# Altium footprint library uw-madison-parts.PcbLib: 40 footprints (part 3 of 3)
Each footprint in its own frame and in the unit in brackets; x right, y up, seen from the top. Pads: shape width x height; smd on the part's side, far side on the other; paste and mask are expansions set on the pad; w line width, h text height; cw(c..) or ccw(c..) is an arc to the next point about the centre after c.
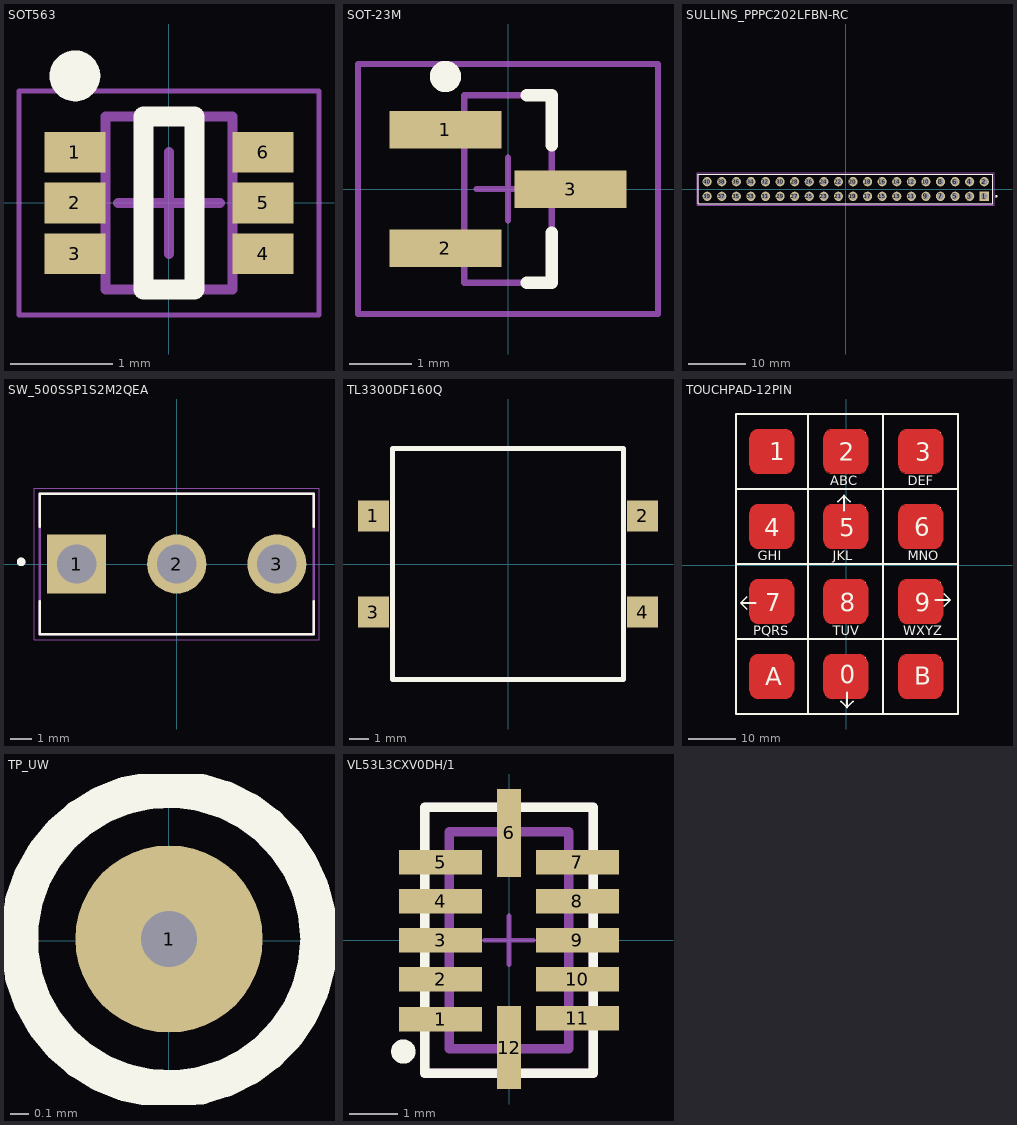
[diagram p2: the footprints below, top view; thin cyan lines are the x and y axes]

## SOT563 [mm]
height 0.5
pads (6):
  rect 0.6x0.4 smd: 1(-0.925,0.5) 2(-0.925,0) 3(-0.925,-0.5) 4(0.925,-0.5) 5(0.925,0) 6(0.925,0.5)
Top Overlay:
  circle w0.25: c-0.925,1.25 r0.125
  lines w0.2: -0.25,-0.85 -0.25,0.85 0.25,0.85 0.25,-0.85 -0.25,-0.85
Top Courtyard:
  lines w0.05: -1.475,-1.1 1.475,-1.1 1.475,1.1 -1.475,1.1 -1.475,-1.1
  lines w0.1: -0.5,0 0.5,0 ; 0,-0.5 0,0.5
Top Assembly:
  lines w0.1: -0.625,-0.85 0.625,-0.85 0.625,0.85 -0.625,0.85 -0.625,-0.85
3D body: height 0.5, standoff 0.1, extent -0.625,-0.85 0.625,0.85

## SOT-23M [mm]
pads (3):
  rect 1.8x0.6 smd: 1(-1,0.95) 2(-1,-0.95) 3(1,0)
Top Overlay:
  circle w0.25: c-1,1.8 r0.125
  lines w0.2: 0.3,-1.5 0.7,-1.5 0.7,-0.7 ; 0.3,1.5 0.7,1.5 0.7,0.7
Mechanical 13:
  lines w0.1: -0.7,-1.5 -0.7,1.5 0.7,1.5 0.7,-1.5 -0.7,-1.5
Mechanical 15:
  lines w0.1: -0.5,0 0.5,0 ; 0,-0.5 0,0.5 ; -2.4,-2 -2.4,2 2.4,2 2.4,-2 -2.4,-2
3D body: height 1.1, standoff 0, extent -0.7,-1.5 0.7,1.5

## SULLINS_PPPC202LFBN-RC [mm]
height 8.5
pads (40):
  rect 1.605x1.605 / inner round 1.605 / far side rect 1.605x1.605 hole 1.07: 1(24.13,-1.27)
  round 1.605 hole 1.07: 2(24.13,1.27) 3(21.59,-1.27) 4(21.59,1.27) 5(19.05,-1.27) 6(19.05,1.27) 7(16.51,-1.27) 8(16.51,1.27) 9(13.97,-1.27) 10(13.97,1.27) 11(11.43,-1.27) 12(11.43,1.27) 13(8.89,-1.27) 14(8.89,1.27) 15(6.35,-1.27) 16(6.35,1.27) 17(3.81,-1.27) 18(3.81,1.27) 19(1.27,-1.27) 20(1.27,1.27) 21(-1.27,-1.27) 22(-1.27,1.27) 23(-3.81,-1.27) 24(-3.81,1.27) 25(-6.35,-1.27) 26(-6.35,1.27) 27(-8.89,-1.27) 28(-8.89,1.27) 29(-11.43,-1.27) 30(-11.43,1.27) 31(-13.97,-1.27) 32(-13.97,1.27) 33(-16.51,-1.27) 34(-16.51,1.27) 35(-19.05,-1.27) 36(-19.05,1.27) 37(-21.59,-1.27) 38(-21.59,1.27) 39(-24.13,-1.27) 40(-24.13,1.27)
Top Overlay:
  circle w0.2: c26.25,-1.27 r0.1
  lines w0.127: -25.65,-2.54 -25.65,2.54 25.65,2.54 25.65,-2.54 -25.65,-2.54
Mechanical 13:
  circle w0.2: c26.25,-1.27 r0.1
  lines w0.127: -25.65,-2.54 -25.65,2.54 25.65,2.54 25.65,-2.54 -25.65,-2.54
Mechanical 15:
  lines w0.05: -25.9,-2.79 -25.9,2.79 25.9,2.79 25.9,-2.79 -25.9,-2.79
3D body "step_temp.STEP": height 8.51, standoff -3.4, extent -25.654,-2.54 25.654,2.54

## SW_500SSP1S2M2QEA [mm]
pads (3):
  rect 2.775x2.775 hole 1.85: 1(-4.7,0)
  round 2.775 hole 1.85: 2(0,0) 3(4.7,0)
Top Overlay:
  circle w0.2: c-7.3,0.1 r0.1
  lines w0.127: -6.425,-1.75 -6.425,-3.3 6.425,-3.3 6.425,-1.75 ; -6.425,1.75 -6.425,3.3 6.425,3.3 6.425,1.75
Mechanical 13:
  circle w0.2: c-7.3,0.1 r0.1
  lines w0.127: -6.425,-3.3 -6.425,3.3 6.425,3.3 6.425,-3.3 -6.425,-3.3
Mechanical 15:
  lines w0.05: -6.675,-3.55 -6.675,3.55 6.675,3.55 6.675,-3.55 -6.675,-3.55
3D body "500SSPxS2M2xEA.stp": height 13.59, standoff -6.6, extent -6.412,-3.329 6.288,3.271

## TL3300DF160Q [mm] "SWITCH TACTILE SPST-NO 0.05A 12V"
pads (4):
  rect 1.6x1.6 smd: 1(-7,2.5) 2(7,2.5) 3(-7,-2.5) 4(7,-2.5)
Top Overlay:
  lines w0.254: -6,-6 -6,6 6,6 6,-6 -6,-6
3D body "TL3300DFxxxQ.stp": height 4.3, standoff -0.3, extent -7.507,-6.031 7.493,5.969

## TOUCHPAD-12PIN [mil] "4X3 numeric touch pad"
pads (12):
  round 5 smd mask+0: 0(162.32,-770.18) 1(-452.68,1104.82) 2(162.32,1104.82) 3(787.32,1104.82) 4(-452.68,479.82) 5(162.32,479.82) 6(787.32,479.82) 7(-452.68,-145.18) 8(162.32,-145.18) 9(787.32,-145.18) 10(-452.68,-770.18) 11(787.32,-770.18)
Top Layer:
  region: 807.32,-815.18 807.32,-1040.18 782.32,-1090.18 732.32,-1115.18 507.32,-1115.18 457.32,-1090.18 432.32,-1040.18 432.32,-815.18 457.32,-765.18 507.32,-740.18 732.32,-740.18 782.32,-765.18
  region: -432.68,-815.18 -432.68,-1040.18 -457.68,-1090.18 -507.68,-1115.18 -732.68,-1115.18 -782.68,-1090.18 -807.68,-1040.18 -807.68,-815.18 -782.68,-765.18 -732.68,-740.18 -507.68,-740.18 -457.68,-765.18
  region: 807.32,-190.18 807.32,-415.18 782.32,-465.18 732.32,-490.18 507.32,-490.18 457.32,-465.18 432.32,-415.18 432.32,-190.18 457.32,-140.18 507.32,-115.18 732.32,-115.18 782.32,-140.18
  region: 182.32,-190.18 182.32,-415.18 157.32,-465.18 107.32,-490.18 -117.68,-490.18 -167.68,-465.18 -192.68,-415.18 -192.68,-190.18 -167.68,-140.18 -117.68,-115.18 107.32,-115.18 157.32,-140.18
  region: -432.68,-190.18 -432.68,-415.18 -457.68,-465.18 -507.68,-490.18 -732.68,-490.18 -782.68,-465.18 -807.68,-415.18 -807.68,-190.18 -782.68,-140.18 -732.68,-115.18 -507.68,-115.18 -457.68,-140.18
  region: 807.32,434.82 807.32,209.82 782.32,159.82 732.32,134.82 507.32,134.82 457.32,159.82 432.32,209.82 432.32,434.82 457.32,484.82 507.32,509.82 732.32,509.82 782.32,484.82
  region: 182.32,434.82 182.32,209.82 157.32,159.82 107.32,134.82 -117.68,134.82 -167.68,159.82 -192.68,209.82 -192.68,434.82 -167.68,484.82 -117.68,509.82 107.32,509.82 157.32,484.82
  region: -432.68,434.82 -432.68,209.82 -457.68,159.82 -507.68,134.82 -732.68,134.82 -782.68,159.82 -807.68,209.82 -807.68,434.82 -782.68,484.82 -732.68,509.82 -507.68,509.82 -457.68,484.82
  region: -432.68,1059.82 -432.68,834.82 -457.68,784.82 -507.68,759.82 -732.68,759.82 -782.68,784.82 -807.68,834.82 -807.68,1059.82 -782.68,1109.82 -732.68,1134.82 -507.68,1134.82 -457.68,1109.82
  region: 182.32,1059.82 182.32,834.82 157.32,784.82 107.32,759.82 -117.68,759.82 -167.68,784.82 -192.68,834.82 -192.68,1059.82 -167.68,1109.82 -117.68,1134.82 107.32,1134.82 157.32,1109.82
  region: 807.32,1059.82 807.32,834.82 782.32,784.82 732.32,759.82 507.32,759.82 457.32,784.82 432.32,834.82 432.32,1059.82 457.32,1109.82 507.32,1134.82 732.32,1134.82 782.32,1109.82
  region: 182.32,-815.18 182.32,-1040.18 157.32,-1090.18 107.32,-1115.18 -117.68,-1115.18 -167.68,-1090.18 -192.68,-1040.18 -192.68,-815.18 -167.68,-765.18 -117.68,-740.18 107.32,-740.18 157.32,-765.18
  lines w10: -802.68,-1040.18 ccw(c-732.68,-1040.18) -732.68,-1110.18 ; -802.68,-815.18 cw(c-732.68,-815.18) -732.68,-745.18 ; -802.68,-415.18 ccw(c-732.68,-415.18) -732.68,-485.18 ; -802.68,-190.18 cw(c-732.68,-190.18) -732.68,-120.18 ; -802.68,209.82 ccw(c-732.68,209.82) -732.68,139.82 ; -802.68,434.82 cw(c-732.68,434.82) -732.68,504.82 ; -802.68,834.82 ccw(c-732.68,834.82) -732.68,764.82 ; -802.68,1059.82 cw(c-732.68,1059.82) -732.68,1129.82 ; -507.68,-1110.18 ccw(c-507.68,-1040.18) -437.68,-1040.18 ; -507.68,-745.18 cw(c-507.68,-815.18) -437.68,-815.18 ; -507.68,-485.18 ccw(c-507.68,-415.18) -437.68,-415.18 ; -507.68,-120.18 cw(c-507.68,-190.18) -437.68,-190.18 ; -507.68,139.82 ccw(c-507.68,209.82) -437.68,209.82 ; -507.68,504.82 cw(c-507.68,434.82) -437.68,434.82 ; -507.68,764.82 ccw(c-507.68,834.82) -437.68,834.82 ; -507.68,1129.82 cw(c-507.68,1059.82) -437.68,1059.82 ; -187.68,-1040.18 ccw(c-117.68,-1040.18) -117.68,-1110.18 ; -187.68,-815.18 cw(c-117.68,-815.18) -117.68,-745.18 ; -187.68,-415.18 ccw(c-117.68,-415.18) -117.68,-485.18 ; -187.68,-190.18 cw(c-117.68,-190.18) -117.68,-120.18 ; -187.68,209.82 ccw(c-117.68,209.82) -117.68,139.82 ; -187.68,434.82 cw(c-117.68,434.82) -117.68,504.82 ; -187.68,834.82 ccw(c-117.68,834.82) -117.68,764.82 ; -187.68,1059.82 cw(c-117.68,1059.82) -117.68,1129.82 ; 107.32,-1110.18 ccw(c107.32,-1040.18) 177.32,-1040.18 ; 107.32,-745.18 cw(c107.32,-815.18) 177.32,-815.18 ; 107.32,-485.18 ccw(c107.32,-415.18) 177.32,-415.18 ; 107.32,-120.18 cw(c107.32,-190.18) 177.32,-190.18 ; 107.32,139.82 ccw(c107.32,209.82) 177.32,209.82 ; 107.32,504.82 cw(c107.32,434.82) 177.32,434.82 ; 107.32,764.82 ccw(c107.32,834.82) 177.32,834.82 ; 107.32,1129.82 cw(c107.32,1059.82) 177.32,1059.82 ; 437.32,-1040.18 ccw(c507.32,-1040.18) 507.32,-1110.18 ; 437.32,-815.18 cw(c507.32,-815.18) 507.32,-745.18 ; 437.32,-415.18 ccw(c507.32,-415.18) 507.32,-485.18 ; 437.32,-190.18 cw(c507.32,-190.18) 507.32,-120.18 ; 437.32,209.82 ccw(c507.32,209.82) 507.32,139.82 ; 437.32,434.82 cw(c507.32,434.82) 507.32,504.82 ; 437.32,834.82 ccw(c507.32,834.82) 507.32,764.82 ; 437.32,1059.82 cw(c507.32,1059.82) 507.32,1129.82 ; 732.32,-1110.18 ccw(c732.32,-1040.18) 802.32,-1040.18 ; 732.32,-745.18 cw(c732.32,-815.18) 802.32,-815.18 ; 732.32,-485.18 ccw(c732.32,-415.18) 802.32,-415.18 ; 732.32,-120.18 cw(c732.32,-190.18) 802.32,-190.18 ; 732.32,139.82 ccw(c732.32,209.82) 802.32,209.82 ; 732.32,504.82 cw(c732.32,434.82) 802.32,434.82 ; 732.32,764.82 ccw(c732.32,834.82) 802.32,834.82 ; 732.32,1129.82 cw(c732.32,1059.82) 802.32,1059.82
Top Overlay:
  lines w15: -827.68,-365.18 -877.68,-315.18 ; -827.68,-265.18 -877.68,-315.18 ; -752.68,-315.18 -877.68,-315.18 ; -67.68,529.82 -17.68,579.82 ; -42.68,-1135.18 7.32,-1185.18 ; -17.68,454.82 -17.68,579.82 ; 7.32,-1060.18 7.32,-1185.18 ; 32.32,529.82 -17.68,579.82 ; 57.32,-1135.18 7.32,-1185.18 ; 742.32,-290.18 867.32,-290.18 ; 817.32,-340.18 867.32,-290.18 ; 817.32,-240.18 867.32,-290.18
  lines w20: -917.68,-615.18 932.32,-615.18 ; -917.68,9.82 932.32,9.82 ; -917.68,634.82 932.32,634.82 ; -317.68,-1240.18 -317.68,1259.82 ; 307.32,-1240.18 307.32,1259.82 ; -917.68,-1240.18 932.32,-1240.18 932.32,1259.82 -917.68,1259.82 -917.68,-1240.18
  text "WXYZ" at 477.32,-585.18 h78.74
  text "TUV" at -112.68,-585.18 h78.74
  text "PQRS" at -772.68,-585.18 h78.74
  text "1" at -642.68,874.82 h150
  text "2" at -62.68,869.82 h150
  text "3" at 577.32,869.82 h150
  text "4" at -682.68,239.82 h150
  text "5" at -57.68,239.82 h150
  text "6" at 567.32,244.82 h150
  text "7" at -672.68,-385.18 h150
  text "8" at -52.68,-385.18 h150
  text "9" at 572.32,-385.18 h150
  text "A" at -672.68,-1000.18 h150
  text "0" at -52.68,-985.18 h150
  text "B" at 567.32,-995.18 h150
  text "ABC" at -132.68,664.82 h78.74
  text "DEF" at 512.32,664.82 h78.74
  text "GHI" at -737.68,39.82 h78.74
  text "JKL" at -112.68,39.82 h78.74
  text "MNO" at 512.32,39.82 h78.74

## TP_UW [mm] "Surface Mount Test point 0.3mm hole, 1mm diameter"
pads (1):
  round 1 hole 0.3: 1(0.002,0.01)
Top Overlay:
  circle w0.2: c0.002,0.01 r0.8

## VL53L3CXV0DH/1 [mm] "Optical Sensor 10mm ~ 310cm I2C Output"
pads (12):
  rect 1.7x0.5 smd paste+0 mask+0: 1(-1.4,-1.621) 2(-1.4,-0.8) 3(-1.4,0) 4(-1.4,0.8) 5(-1.4,1.6) 7(1.4,1.6) 8(1.4,0.8) 9(1.4,0) 10(1.4,-0.8) 11(1.4,-1.6)
  rect 0.5x1.8 smd paste+0 mask+0: 6(0,2.2)
  rect 0.5x1.7 smd paste+0 mask+0: 12(0,-2.2)
Top Overlay:
  circle w0.25: c-2.166,-2.282 r0.125
  lines w0.2: -1.725,-2.725 -1.725,2.725 1.725,2.725 1.725,-2.725 -1.725,-2.725
Top 3D Body:
  lines w0.2: -1.225,-2.225 -1.225,2.225 1.225,2.225 1.225,-2.225 -1.225,-2.225
Top Courtyard:
  lines w0.2: -1.725,-2.725 -1.725,2.725 1.725,2.725 1.725,-2.725 -1.725,-2.725
Top Assembly:
  lines w0.2: -1.725,-2.725 -1.725,2.725 1.725,2.725 1.725,-2.725 -1.725,-2.725
Top Component Center:
  lines w0.1: -0.5,0 0.5,0 ; 0,-0.5 0,0.5
3D body "IC_STMicroelectronics_VL53L3CXV0DH-1_eec.STEP": height 0.25, standoff 0, extent -1.725,-2.725 1.725,2.725